# Altium footprint library TerminalBlock_5.08mm.PcbLib: 1 footprints
Each footprint in its own frame and in the unit in brackets; x right, y up, seen from the top. Pads: shape width x height; smd on the part's side, far side on the other; paste and mask are expansions set on the pad; w line width, h text height; cw(c..) or ccw(c..) is an arc to the next point about the centre after c.
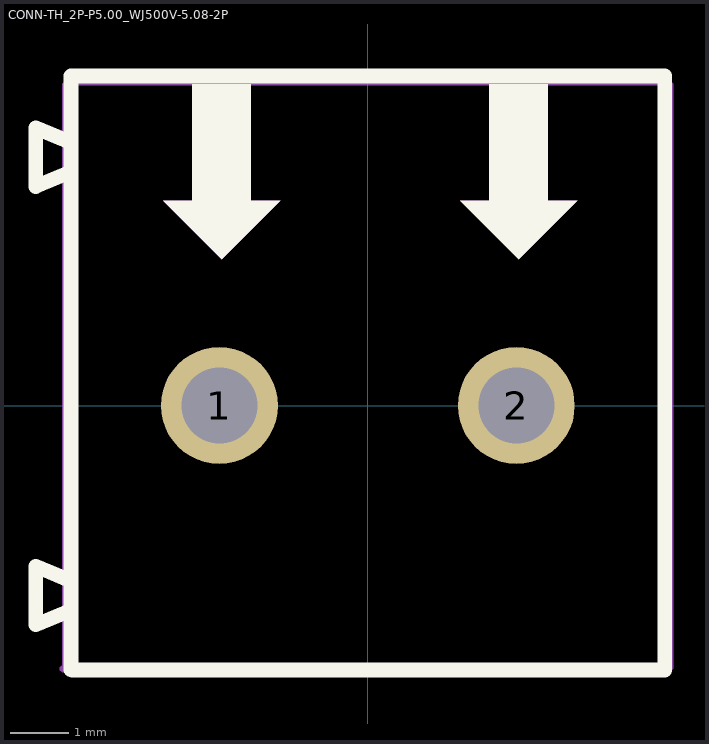
[diagram p0: the footprint, top view; thin cyan lines are the x and y axes]

## CONN-TH_2P-P5.00_WJ500V-5.08-2P [mm]
pads (2):
  round 2 hole 1.3: 1(-2.54,0) 2(2.54,0)
Top Overlay:
  region: -3,5.5 -2,5.5 -2,3.5 -1.5,3.5 -2.5,2.5 -3.5,3.5 -3,3.5
  region: 2.08,5.5 3.08,5.5 3.08,3.5 3.58,3.5 2.58,2.5 1.58,3.5 2.08,3.5
  lines w0.254: -5.08,-4.52 -5.08,5.64 ; -5.08,-3.5 -5.68,-3.75 -5.68,-2.75 -5.08,-3 ; -5.08,4 -5.68,3.75 -5.68,4.75 -5.08,4.5 ; -5.054,-4.522 5.08,-4.522 5.08,5.638 -5.054,5.638
Mechanical 6:
  region: 2.08,5.5 3.08,5.5 3.08,3.5 3.58,3.5 2.58,2.5 1.58,3.5 2.08,3.5
  region: -3,5.5 -2,5.5 -2,3.5 -1.5,3.5 -2.5,2.5 -3.5,3.5 -3,3.5
Mechanical 7:
  lines w0.051: -5.207,-4.5 5.207,-4.5 5.207,5.5 -5.207,5.5 -5.207,-4.5
Mechanical 8:
  region: -5.147,-4.5 -5.147,-4.525 -5.182,-4.56 -5.232,-4.56 -5.267,-4.525 -5.267,-4.5 -5.267,-4.475 -5.232,-4.44 -5.182,-4.44 -5.147,-4.475 -5.147,-4.5
Mechanical 9:
  region: 3.09,0 3.09,-0.109 3.006,-0.312 2.852,-0.466 2.649,-0.55 2.431,-0.55 2.228,-0.466 2.074,-0.312 1.99,-0.109 1.99,0 1.99,0.109 2.074,0.312 2.228,0.466 2.431,0.55 2.649,0.55 2.852,0.466 3.006,0.312 3.09,0.109 3.09,0
  region: -1.99,0 -1.99,-0.109 -2.074,-0.312 -2.228,-0.466 -2.431,-0.55 -2.649,-0.55 -2.852,-0.466 -3.006,-0.312 -3.09,-0.109 -3.09,0 -3.09,0.109 -3.006,0.312 -2.852,0.466 -2.649,0.55 -2.431,0.55 -2.228,0.466 -2.074,0.312 -1.99,0.109 -1.99,0